# Altium footprint library PcbLib1.PcbLib: 335 footprints (part 2 of 22)
Each footprint in its own frame and in the unit in brackets; x right, y up, seen from the top. Pads: shape width x height; smd on the part's side, far side on the other; paste and mask are expansions set on the pad; w line width, h text height; cw(c..) or ccw(c..) is an arc to the next point about the centre after c.
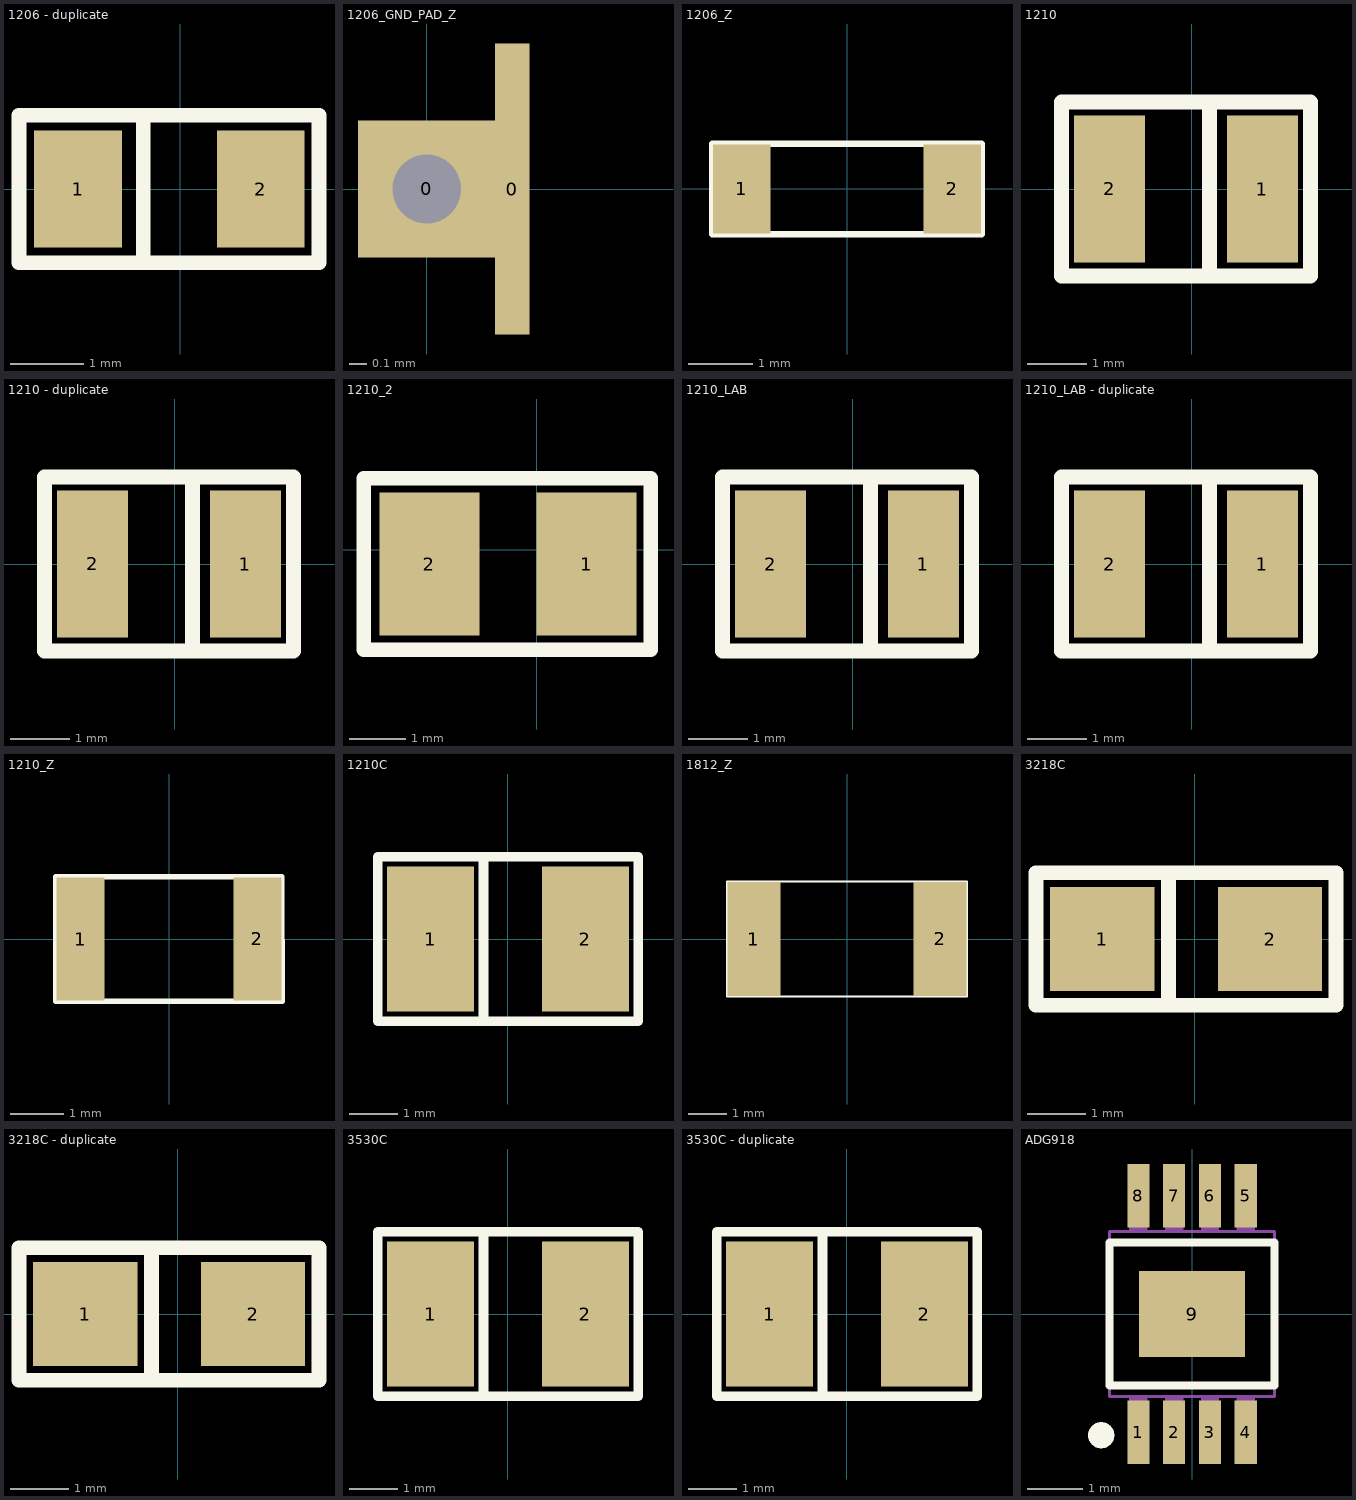
[diagram p1: the footprints below, top view; thin cyan lines are the x and y axes]

## 1206 - duplicate [mm]
pads (2):
  rect 1.2x1.6 smd: 1(-1.4,0) 2(1.1,0)
Top Overlay:
  lines w0.2: -0.508,-1.007 -0.508,1.01 ; -2.208,-1.007 -2.208,1.01 1.9,1.01 1.9,-1.007 -2.208,-1.007

## 1206_GND_PAD_Z [mm]
pads (2):
  rect 0.8x0.8 smd mask+0.051: 0(0,0)
  rect 0.2x1.7 smd mask+0.051: 0(0.5,0)
via 0,0 diameter 0.6 hole 0.4

## 1206_Z [mm]
pads (2):
  rect 0.9x1.4 smd: 1(-1.65,0) 2(1.65,0)
Top Overlay:
  lines w0.1: -2.11,-0.71 -2.11,0.701 ; -2.108,0.71 2.11,0.71 2.11,-0.712 ; -2.107,-0.71 2.112,-0.71
3D body: height 1.3, standoff 0, extent -1.51,-0.703 1.51,0.702

## 1210 [mm]
pads (2):
  rect 1.2x2.5 smd: 1(1.2,0) 2(-1.4,0)
Top Overlay:
  lines w0.254: 0.3,-1.4 0.3,1.4 ; -2.22,-1.48 -2.22,1.48 2.02,1.48 2.02,-1.48 -2.22,-1.48

## 1210 - duplicate [mm]
pads (2):
  rect 1.2x2.5 smd: 1(1.2,0) 2(-1.4,0)
Top Overlay:
  lines w0.254: 0.3,-1.4 0.3,1.4 ; -2.22,-1.48 -2.22,1.48 2.02,1.48 2.02,-1.48 -2.22,-1.48

## 1210_2 [mil]
pads (2):
  rect 70x100 smd: 1(35,-10) 2(-75,-10)
Top Overlay:
  lines w10: -121,-70 80,-70 80,50 -121,50 -121,-70

## 1210_LAB [mm]
pads (2):
  rect 1.2x2.5 smd: 1(1.2,0) 2(-1.4,0)
Top Overlay:
  lines w0.254: 0.3,-1.4 0.3,1.4 ; -2.22,-1.48 -2.22,1.48 2.02,1.48 2.02,-1.48 -2.22,-1.48

## 1210_LAB - duplicate [mm]
pads (2):
  rect 1.2x2.5 smd: 1(1.2,0) 2(-1.4,0)
Top Overlay:
  lines w0.254: 0.3,-1.4 0.3,1.4 ; -2.22,-1.48 -2.22,1.48 2.02,1.48 2.02,-1.48 -2.22,-1.48

## 1210_Z [mm]
pads (2):
  rect 0.9x2.3 smd: 1(-1.65,0) 2(1.65,0)
Top Overlay:
  lines w0.1: -2.113,1.16 -2.113,-1.16 2.112,-1.16 ; -2.108,1.16 2.11,1.16 ; 2.107,1.148 2.111,-1.158
3D body: height 1.3, standoff 0, extent -1.785,-1.126 1.674,1.131

## 1210C [mm]
height 12
pads (2):
  rect 1.8x3 smd: 1(-1.6,0) 2(1.6,0)
Top Overlay:
  lines w0.2: -0.506,-1.702 -0.506,1.702 ; -2.692,-1.702 -2.692,1.702 2.692,1.702 2.692,-1.702 -2.692,-1.702

## 1812_Z [mm]
pads (2):
  rect 1.4x3 smd: 1(-2.45,0) 2(2.45,0)
Top Overlay:
  lines w0.05: 3.155,-1.51 -3.16,-1.51 -3.16,1.51 3.158,1.51 3.158,-1.51
3D body: height 1.3, standoff 0, extent -1.785,-1.126 1.674,1.131

## 3218C [mm]
pads (2):
  rect 1.8x1.8 smd: 1(-1.6,0) 2(1.3,0)
Top Overlay:
  lines w0.254: -0.455,-1.092 -0.455,1.118 ; -2.743,-1.143 2.438,-1.143 2.438,1.143 -2.743,1.143 -2.743,-1.143

## 3218C - duplicate [mm]
pads (2):
  rect 1.8x1.8 smd: 1(-1.6,0) 2(1.3,0)
Top Overlay:
  lines w0.254: -0.455,-1.092 -0.455,1.118 ; -2.743,-1.143 2.438,-1.143 2.438,1.143 -2.743,1.143 -2.743,-1.143

## 3530C [mm]
pads (2):
  rect 1.8x3 smd: 1(-1.6,0) 2(1.6,0)
Top Overlay:
  lines w0.2: -0.506,-1.702 -0.506,1.702 ; -2.692,-1.702 -2.692,1.702 2.692,1.702 2.692,-1.702 -2.692,-1.702

## 3530C - duplicate [mm]
pads (2):
  rect 1.8x3 smd: 1(-1.6,0) 2(1.6,0)
Top Overlay:
  lines w0.2: -0.506,-1.702 -0.506,1.702 ; -2.692,-1.702 -2.692,1.702 2.692,1.702 2.692,-1.702 -2.692,-1.702

## ADG918 [mm]
pads (9):
  rect 0.4x1.15 smd: 1(-0.975,-2.15) 2(-0.325,-2.15) 3(0.325,-2.15) 4(0.975,-2.15) 5(0.975,2.15) 6(0.325,2.15) 7(-0.325,2.15) 8(-0.975,2.15)
  rect 1.93x1.57 smd mask+0.102: 9(0,0)
Top Overlay:
  lines w0.15: -1.5,1.3 -1.5,-1.3 1.5,-1.3 1.5,1.3 ; -1.478,1.298 1.499,1.298
  lines w0.239: -1.77,-2.202 -1.76,-2.156 -1.735,-2.116 -1.697,-2.09 -1.651,-2.08 -1.605,-2.09 -1.565,-2.116 -1.539,-2.156 -1.532,-2.202 -1.539,-2.248 -1.565,-2.286 -1.605,-2.311 -1.651,-2.322 -1.697,-2.311 -1.735,-2.286 -1.76,-2.248 -1.77,-2.202
Mechanical 6:
  lines w0.051: -1.501,-1.5 -1.5,1.5 ; -1.501,1.499 1.499,1.499 ; -1.5,-1.5 1.5,-1.5 1.5,1.5
Mechanical 7:
  region: -0.813,1.488 -0.813,1.839 -1.138,1.839 -1.138,1.488
  region: -0.163,1.488 -0.163,1.839 -0.488,1.839 -0.488,1.488
  region: 1.135,1.488 1.135,1.839 0.813,1.839 0.813,1.488
  region: 0.488,1.488 0.488,1.839 0.163,1.839 0.163,1.488
  region: -1.138,-1.491 -1.138,-1.841 -0.813,-1.841 -0.813,-1.491
  region: -0.488,-1.491 -0.488,-1.841 -0.163,-1.841 -0.163,-1.491
  region: 0.813,-1.491 0.813,-1.841 1.135,-1.841 1.135,-1.491
  region: 0.163,-1.491 0.163,-1.841 0.488,-1.841 0.488,-1.491
Mechanical 9:
  region: -0.813,1.803 -1.138,1.803 -1.138,2.449 -0.813,2.449
  region: -0.163,1.803 -0.488,1.803 -0.488,2.449 -0.163,2.449
  region: 1.138,1.803 0.813,1.803 0.813,2.449 1.138,2.449
  region: 0.488,1.803 0.163,1.803 0.163,2.449 0.488,2.449
  region: -1.138,-1.803 -0.813,-1.803 -0.813,-2.451 -1.138,-2.451
  region: -0.488,-1.803 -0.163,-1.803 -0.163,-2.451 -0.488,-2.451
  region: 0.813,-1.806 1.138,-1.806 1.138,-2.451 0.813,-2.451
  region: 0.163,-1.803 0.488,-1.803 0.488,-2.451 0.163,-2.451